# Altium schematic symbol library 调理电路板.SCHLIB: 432 symbols (part 7 of 8)
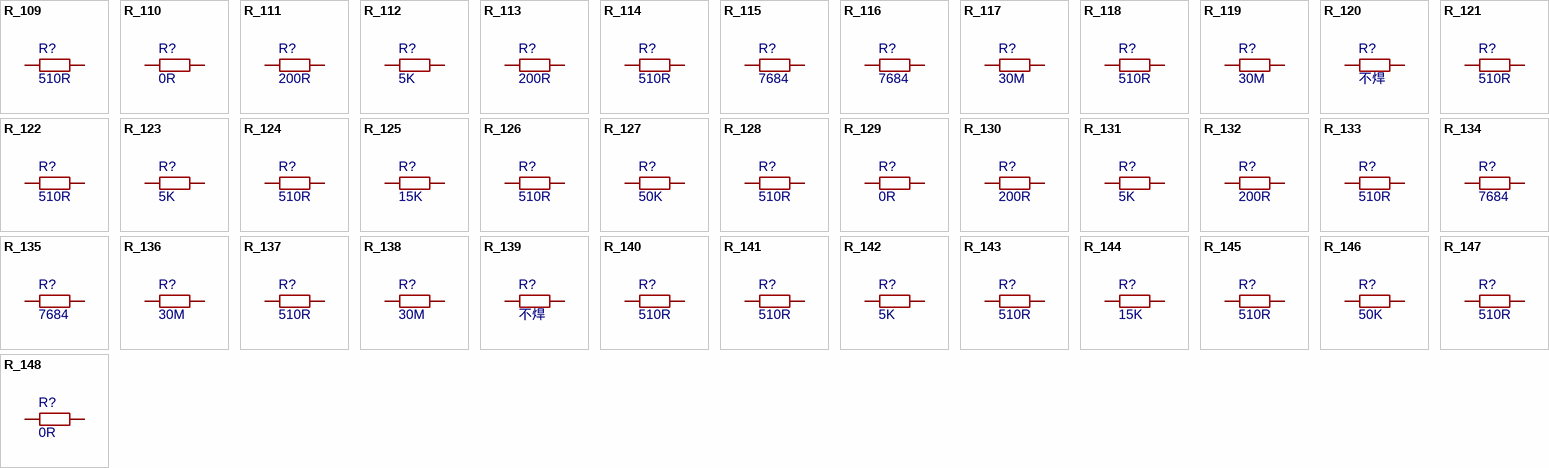
[diagram p16: symbols R_109 to R_148]

## R_144
designator R?, comment 15K
贴片电阻; Device: R; 版权归属: 来自淘宝 ID：黄晶宝石; 封装库来自淘宝卖家 ID：黄晶宝石: 其他店铺购入均为盗版，不享受售后技术支持服务，请立即申请退款; Origin Footprint: R 0201_L; OriginFootprint 2: R 0402_L; OriginFootprint 3: R 0805_L; OriginFootprint 4: R 1206_L; OriginFootprint 5: R 1210_L; OriginFootprint 6: R 1812_L; OriginFootprint 7: R 2010_L; OriginFootprint 8: R 2512_L; OriginFootprint 9: R 0201_M; OriginFootprint 10: R 0402_M; OriginFootprint 11: R 0603_M; OriginFootprint 12: R 0805_M; OriginFootprint 13: R 1206_M; OriginFootprint 14: R 1210_M; OriginFootprint 15: R 1812_M; OriginFootprint 16: R 2010_M; OriginFootprint 17: R 2512_M; UniqueId: c8e7fea75ae2c195; AddInBom: yes; OriginModelName: R 0603; BOM名称: 贴片电阻; 联系售后: https://shop463601444.taobao.com; DesignItemID: R; LibraryName: 0.1 - 电阻-电容-电感; SymbolName: R; FootprintName: R 0603_L
footprint R 0603_L
pins: 1, 2

## R_145
designator R?, comment 510R
贴片电阻; Device: R; 版权归属: 来自淘宝 ID：黄晶宝石; 封装库来自淘宝卖家 ID：黄晶宝石: 其他店铺购入均为盗版，不享受售后技术支持服务，请立即申请退款; Origin Footprint: R 0201_L; OriginFootprint 2: R 0402_L; OriginFootprint 3: R 0805_L; OriginFootprint 4: R 1206_L; OriginFootprint 5: R 1210_L; OriginFootprint 6: R 1812_L; OriginFootprint 7: R 2010_L; OriginFootprint 8: R 2512_L; OriginFootprint 9: R 0201_M; OriginFootprint 10: R 0402_M; OriginFootprint 11: R 0603_M; OriginFootprint 12: R 0805_M; OriginFootprint 13: R 1206_M; OriginFootprint 14: R 1210_M; OriginFootprint 15: R 1812_M; OriginFootprint 16: R 2010_M; OriginFootprint 17: R 2512_M; UniqueId: 0a743140f9ea7b14; AddInBom: yes; OriginModelName: R 0603; BOM名称: 贴片电阻; 联系售后: https://shop463601444.taobao.com; DesignItemID: R; LibraryName: 0.1 - 电阻-电容-电感; SymbolName: R; FootprintName: R 0603_L
footprint R 0603_L
pins: 1, 2

## R_146
designator R?, comment 50K
贴片电阻; Device: R; 版权归属: 来自淘宝 ID：黄晶宝石; 封装库来自淘宝卖家 ID：黄晶宝石: 其他店铺购入均为盗版，不享受售后技术支持服务，请立即申请退款; Origin Footprint: R 0201_L; OriginFootprint 2: R 0402_L; OriginFootprint 3: R 0805_L; OriginFootprint 4: R 1206_L; OriginFootprint 5: R 1210_L; OriginFootprint 6: R 1812_L; OriginFootprint 7: R 2010_L; OriginFootprint 8: R 2512_L; OriginFootprint 9: R 0201_M; OriginFootprint 10: R 0402_M; OriginFootprint 11: R 0603_M; OriginFootprint 12: R 0805_M; OriginFootprint 13: R 1206_M; OriginFootprint 14: R 1210_M; OriginFootprint 15: R 1812_M; OriginFootprint 16: R 2010_M; OriginFootprint 17: R 2512_M; UniqueId: 214b1954295082c1; AddInBom: yes; OriginModelName: R 0603; BOM名称: 贴片电阻; 联系售后: https://shop463601444.taobao.com; DesignItemID: R; LibraryName: 0.1 - 电阻-电容-电感; SymbolName: R; FootprintName: R 0603_L
footprint R 0603_L
pins: 1, 2

## R_147
designator R?, comment 510R
贴片电阻; Device: R; 版权归属: 来自淘宝 ID：黄晶宝石; 封装库来自淘宝卖家 ID：黄晶宝石: 其他店铺购入均为盗版，不享受售后技术支持服务，请立即申请退款; Origin Footprint: R 0201_L; OriginFootprint 2: R 0402_L; OriginFootprint 3: R 0805_L; OriginFootprint 4: R 1206_L; OriginFootprint 5: R 1210_L; OriginFootprint 6: R 1812_L; OriginFootprint 7: R 2010_L; OriginFootprint 8: R 2512_L; OriginFootprint 9: R 0201_M; OriginFootprint 10: R 0402_M; OriginFootprint 11: R 0603_M; OriginFootprint 12: R 0805_M; OriginFootprint 13: R 1206_M; OriginFootprint 14: R 1210_M; OriginFootprint 15: R 1812_M; OriginFootprint 16: R 2010_M; OriginFootprint 17: R 2512_M; UniqueId: 21524ddd3d38a4e3; AddInBom: yes; OriginModelName: R 0603; BOM名称: 贴片电阻; 联系售后: https://shop463601444.taobao.com; DesignItemID: R; LibraryName: 0.1 - 电阻-电容-电感; SymbolName: R; FootprintName: R 0603_L
footprint R 0603_L
pins: 1, 2

## R_148
designator R?, comment 0R
贴片电阻; Device: R; 版权归属: 来自淘宝 ID：黄晶宝石; 封装库来自淘宝卖家 ID：黄晶宝石: 其他店铺购入均为盗版，不享受售后技术支持服务，请立即申请退款; Origin Footprint: R 0201_L; OriginFootprint 2: R 0402_L; OriginFootprint 3: R 0805_L; OriginFootprint 4: R 1206_L; OriginFootprint 5: R 1210_L; OriginFootprint 6: R 1812_L; OriginFootprint 7: R 2010_L; OriginFootprint 8: R 2512_L; OriginFootprint 9: R 0201_M; OriginFootprint 10: R 0402_M; OriginFootprint 11: R 0603_M; OriginFootprint 12: R 0805_M; OriginFootprint 13: R 1206_M; OriginFootprint 14: R 1210_M; OriginFootprint 15: R 1812_M; OriginFootprint 16: R 2010_M; OriginFootprint 17: R 2512_M; UniqueId: 58812c969b98ff54; AddInBom: yes; OriginModelName: R 0603; BOM名称: 贴片电阻; 联系售后: https://shop463601444.taobao.com; DesignItemID: R; LibraryName: 0.1 - 电阻-电容-电感; SymbolName: R; FootprintName: R 0603_L
footprint R 0603_L
pins: 1, 2

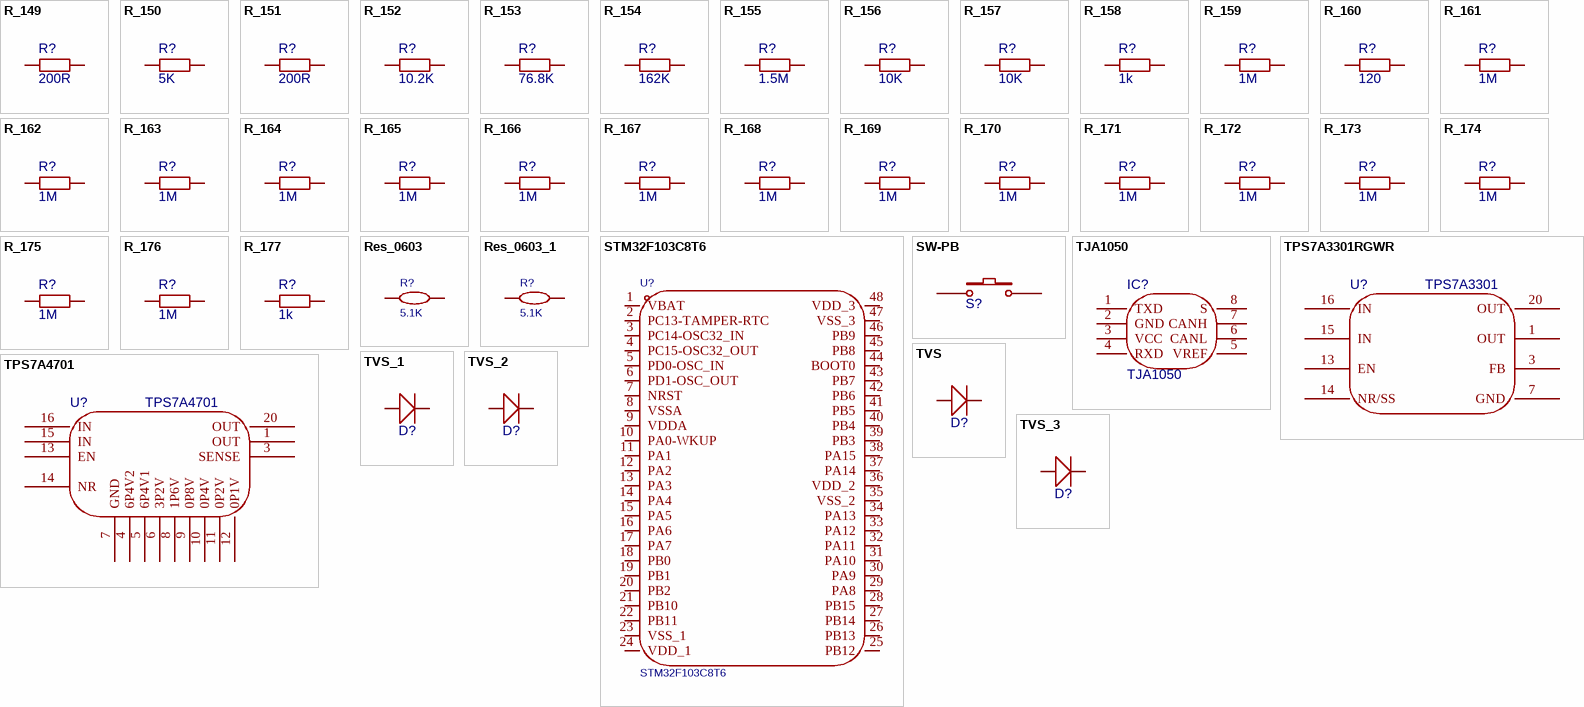
[diagram p9: symbols R_149 to TVS_3]

## R_149
designator R?, comment 200R
贴片电阻; Device: R; 版权归属: 来自淘宝 ID：黄晶宝石; 封装库来自淘宝卖家 ID：黄晶宝石: 其他店铺购入均为盗版，不享受售后技术支持服务，请立即申请退款; Origin Footprint: R 0201_L; OriginFootprint 2: R 0402_L; OriginFootprint 3: R 0805_L; OriginFootprint 4: R 1206_L; OriginFootprint 5: R 1210_L; OriginFootprint 6: R 1812_L; OriginFootprint 7: R 2010_L; OriginFootprint 8: R 2512_L; OriginFootprint 9: R 0201_M; OriginFootprint 10: R 0402_M; OriginFootprint 11: R 0603_M; OriginFootprint 12: R 0805_M; OriginFootprint 13: R 1206_M; OriginFootprint 14: R 1210_M; OriginFootprint 15: R 1812_M; OriginFootprint 16: R 2010_M; OriginFootprint 17: R 2512_M; UniqueId: f788f9d74fd2ea8c; AddInBom: yes; OriginModelName: R 0603; BOM名称: 贴片电阻; 联系售后: https://shop463601444.taobao.com; DesignItemID: R; LibraryName: 0.1 - 电阻-电容-电感; SymbolName: R; FootprintName: R 0603_L
footprint R 0603_L
pins: 1, 2

## R_150
designator R?, comment 5K
贴片电阻; Device: R; 版权归属: 来自淘宝 ID：黄晶宝石; 封装库来自淘宝卖家 ID：黄晶宝石: 其他店铺购入均为盗版，不享受售后技术支持服务，请立即申请退款; Origin Footprint: R 0201_L; OriginFootprint 2: R 0402_L; OriginFootprint 3: R 0805_L; OriginFootprint 4: R 1206_L; OriginFootprint 5: R 1210_L; OriginFootprint 6: R 1812_L; OriginFootprint 7: R 2010_L; OriginFootprint 8: R 2512_L; OriginFootprint 9: R 0201_M; OriginFootprint 10: R 0402_M; OriginFootprint 11: R 0603_M; OriginFootprint 12: R 0805_M; OriginFootprint 13: R 1206_M; OriginFootprint 14: R 1210_M; OriginFootprint 15: R 1812_M; OriginFootprint 16: R 2010_M; OriginFootprint 17: R 2512_M; UniqueId: 5e1d1d1645697b34; AddInBom: yes; OriginModelName: R 0603; BOM名称: 贴片电阻; 联系售后: https://shop463601444.taobao.com; DesignItemID: R; LibraryName: 0.1 - 电阻-电容-电感; SymbolName: R; FootprintName: R 0603_L
footprint R 0603_L
pins: 1, 2

## R_151
designator R?, comment 200R
贴片电阻; Device: R; 版权归属: 来自淘宝 ID：黄晶宝石; 封装库来自淘宝卖家 ID：黄晶宝石: 其他店铺购入均为盗版，不享受售后技术支持服务，请立即申请退款; Origin Footprint: R 0201_L; OriginFootprint 2: R 0402_L; OriginFootprint 3: R 0805_L; OriginFootprint 4: R 1206_L; OriginFootprint 5: R 1210_L; OriginFootprint 6: R 1812_L; OriginFootprint 7: R 2010_L; OriginFootprint 8: R 2512_L; OriginFootprint 9: R 0201_M; OriginFootprint 10: R 0402_M; OriginFootprint 11: R 0603_M; OriginFootprint 12: R 0805_M; OriginFootprint 13: R 1206_M; OriginFootprint 14: R 1210_M; OriginFootprint 15: R 1812_M; OriginFootprint 16: R 2010_M; OriginFootprint 17: R 2512_M; UniqueId: e95d98ae4f6ade20; AddInBom: yes; OriginModelName: R 0603; BOM名称: 贴片电阻; 联系售后: https://shop463601444.taobao.com; DesignItemID: R; LibraryName: 0.1 - 电阻-电容-电感; SymbolName: R; FootprintName: R 0603_L
footprint R 0603_L
pins: 1, 2

## R_152
designator R?, comment 10.2K
贴片电阻; Device: R; 版权归属: 来自淘宝 ID：黄晶宝石; 封装库来自淘宝卖家 ID：黄晶宝石: 其他店铺购入均为盗版，不享受售后技术支持服务，请立即申请退款; Origin Footprint: R 0201_L; OriginFootprint 2: R 0402_L; OriginFootprint 3: R 0805_L; OriginFootprint 4: R 1206_L; OriginFootprint 5: R 1210_L; OriginFootprint 6: R 1812_L; OriginFootprint 7: R 2010_L; OriginFootprint 8: R 2512_L; OriginFootprint 9: R 0201_M; OriginFootprint 10: R 0402_M; OriginFootprint 11: R 0603_M; OriginFootprint 12: R 0805_M; OriginFootprint 13: R 1206_M; OriginFootprint 14: R 1210_M; OriginFootprint 15: R 1812_M; OriginFootprint 16: R 2010_M; OriginFootprint 17: R 2512_M; UniqueId: a4530fd3332868cb; AddInBom: yes; OriginModelName: R 0603; BOM名称: 贴片电阻; 联系售后: https://shop463601444.taobao.com; DesignItemID: R; LibraryName: 0.1 - 电阻-电容-电感; SymbolName: R; FootprintName: R 0603_L
footprint R 0603_L
pins: 1, 2

## R_153
designator R?, comment 76.8K
贴片电阻; Device: R; 版权归属: 来自淘宝 ID：黄晶宝石; 封装库来自淘宝卖家 ID：黄晶宝石: 其他店铺购入均为盗版，不享受售后技术支持服务，请立即申请退款; Origin Footprint: R 0201_L; OriginFootprint 2: R 0402_L; OriginFootprint 3: R 0805_L; OriginFootprint 4: R 1206_L; OriginFootprint 5: R 1210_L; OriginFootprint 6: R 1812_L; OriginFootprint 7: R 2010_L; OriginFootprint 8: R 2512_L; OriginFootprint 9: R 0201_M; OriginFootprint 10: R 0402_M; OriginFootprint 11: R 0603_M; OriginFootprint 12: R 0805_M; OriginFootprint 13: R 1206_M; OriginFootprint 14: R 1210_M; OriginFootprint 15: R 1812_M; OriginFootprint 16: R 2010_M; OriginFootprint 17: R 2512_M; UniqueId: b63c70a29a00d898; AddInBom: yes; OriginModelName: R 0603; BOM名称: 贴片电阻; 联系售后: https://shop463601444.taobao.com; DesignItemID: R; LibraryName: 0.1 - 电阻-电容-电感; SymbolName: R; FootprintName: R 0603_L
footprint R 0603_L
pins: 1, 2

## R_154
designator R?, comment 162K
贴片电阻; Device: R; 版权归属: 来自淘宝 ID：黄晶宝石; 封装库来自淘宝卖家 ID：黄晶宝石: 其他店铺购入均为盗版，不享受售后技术支持服务，请立即申请退款; Origin Footprint: R 0201_L; OriginFootprint 2: R 0402_L; OriginFootprint 3: R 0805_L; OriginFootprint 4: R 1206_L; OriginFootprint 5: R 1210_L; OriginFootprint 6: R 1812_L; OriginFootprint 7: R 2010_L; OriginFootprint 8: R 2512_L; OriginFootprint 9: R 0201_M; OriginFootprint 10: R 0402_M; OriginFootprint 11: R 0603_M; OriginFootprint 12: R 0805_M; OriginFootprint 13: R 1206_M; OriginFootprint 14: R 1210_M; OriginFootprint 15: R 1812_M; OriginFootprint 16: R 2010_M; OriginFootprint 17: R 2512_M; UniqueId: 244f6e1f247c71b7; AddInBom: yes; OriginModelName: R 0603; BOM名称: 贴片电阻; 联系售后: https://shop463601444.taobao.com; DesignItemID: R; LibraryName: 0.1 - 电阻-电容-电感; SymbolName: R; FootprintName: R 0603_L
footprint R 0603_L
pins: 1, 2

## R_155
designator R?, comment 1.5M
贴片电阻; Device: R; 版权归属: 来自淘宝 ID：黄晶宝石; 封装库来自淘宝卖家 ID：黄晶宝石: 其他店铺购入均为盗版，不享受售后技术支持服务，请立即申请退款; Origin Footprint: R 0201_L; OriginFootprint 2: R 0402_L; OriginFootprint 3: R 0805_L; OriginFootprint 4: R 1206_L; OriginFootprint 5: R 1210_L; OriginFootprint 6: R 1812_L; OriginFootprint 7: R 2010_L; OriginFootprint 8: R 2512_L; OriginFootprint 9: R 0201_M; OriginFootprint 10: R 0402_M; OriginFootprint 11: R 0603_M; OriginFootprint 12: R 0805_M; OriginFootprint 13: R 1206_M; OriginFootprint 14: R 1210_M; OriginFootprint 15: R 1812_M; OriginFootprint 16: R 2010_M; OriginFootprint 17: R 2512_M; UniqueId: 361000c835d78b62; AddInBom: yes; OriginModelName: R 0603; BOM名称: 贴片电阻; 联系售后: https://shop463601444.taobao.com; DesignItemID: R; LibraryName: 0.1 - 电阻-电容-电感; SymbolName: R; FootprintName: R 0603_L
footprint R 0603_L
pins: 1, 2

## R_156
designator R?, comment 10K
贴片电阻; Device: R; 版权归属: 来自淘宝 ID：黄晶宝石; 封装库来自淘宝卖家 ID：黄晶宝石: 其他店铺购入均为盗版，不享受售后技术支持服务，请立即申请退款; Origin Footprint: R 0201_L; OriginFootprint 2: R 0402_L; OriginFootprint 3: R 0805_L; OriginFootprint 4: R 1206_L; OriginFootprint 5: R 1210_L; OriginFootprint 6: R 1812_L; OriginFootprint 7: R 2010_L; OriginFootprint 8: R 2512_L; OriginFootprint 9: R 0201_M; OriginFootprint 10: R 0402_M; OriginFootprint 11: R 0603_M; OriginFootprint 12: R 0805_M; OriginFootprint 13: R 1206_M; OriginFootprint 14: R 1210_M; OriginFootprint 15: R 1812_M; OriginFootprint 16: R 2010_M; OriginFootprint 17: R 2512_M; UniqueId: 220907c6c27367a9; AddInBom: yes; OriginModelName: R 0603; BOM名称: 贴片电阻; 联系售后: https://shop463601444.taobao.com; DesignItemID: R; LibraryName: 0.1 - 电阻-电容-电感; SymbolName: R; FootprintName: R 0603_L
footprint R 0603_L
pins: 1, 2

## R_157
designator R?, comment 10K
贴片电阻; Device: R; 版权归属: 来自淘宝 ID：黄晶宝石; 封装库来自淘宝卖家 ID：黄晶宝石: 其他店铺购入均为盗版，不享受售后技术支持服务，请立即申请退款; Origin Footprint: R 0201_L; OriginFootprint 2: R 0402_L; OriginFootprint 3: R 0805_L; OriginFootprint 4: R 1206_L; OriginFootprint 5: R 1210_L; OriginFootprint 6: R 1812_L; OriginFootprint 7: R 2010_L; OriginFootprint 8: R 2512_L; OriginFootprint 9: R 0201_M; OriginFootprint 10: R 0402_M; OriginFootprint 11: R 0603_M; OriginFootprint 12: R 0805_M; OriginFootprint 13: R 1206_M; OriginFootprint 14: R 1210_M; OriginFootprint 15: R 1812_M; OriginFootprint 16: R 2010_M; OriginFootprint 17: R 2512_M; AddInBom: yes; OriginModelName: R 0603; BOM名称: 贴片电阻; 联系售后: https://shop463601444.taobao.com; DesignItemID: R; LibraryName: 0.1 - 电阻-电容-电感; Symbol: R; FootprintName: R 0603_L
footprint R 0603_L
pins: 1, 2

## R_158
designator R?, comment 1k
贴片电阻; Device: R; 版权归属: 来自淘宝 ID：黄晶宝石; 封装库来自淘宝卖家 ID：黄晶宝石: 其他店铺购入均为盗版，不享受售后技术支持服务，请立即申请退款; Origin Footprint: R 0201_L; OriginFootprint 2: R 0402_L; OriginFootprint 3: R 0805_L; OriginFootprint 4: R 1206_L; OriginFootprint 5: R 1210_L; OriginFootprint 6: R 1812_L; OriginFootprint 7: R 2010_L; OriginFootprint 8: R 2512_L; OriginFootprint 9: R 0201_M; OriginFootprint 10: R 0402_M; OriginFootprint 11: R 0603_M; OriginFootprint 12: R 0805_M; OriginFootprint 13: R 1206_M; OriginFootprint 14: R 1210_M; OriginFootprint 15: R 1812_M; OriginFootprint 16: R 2010_M; OriginFootprint 17: R 2512_M; AddInBom: yes; OriginModelName: R 0603; BOM名称: 贴片电阻; 联系售后: https://shop463601444.taobao.com; DesignItemID: R; LibraryName: 0.1 - 电阻-电容-电感; Symbol: R; FootprintName: R 0603_L
footprint R 0603_L
pins: 1, 2

## R_159
designator R?, comment 1M
贴片电阻; Device: R; 版权归属: 来自淘宝 ID：黄晶宝石; 封装库来自淘宝卖家 ID：黄晶宝石: 其他店铺购入均为盗版，不享受售后技术支持服务，请立即申请退款; Origin Footprint: R 0201_L; OriginFootprint 2: R 0402_L; OriginFootprint 3: R 0805_L; OriginFootprint 4: R 1206_L; OriginFootprint 5: R 1210_L; OriginFootprint 6: R 1812_L; OriginFootprint 7: R 2010_L; OriginFootprint 8: R 2512_L; OriginFootprint 9: R 0201_M; OriginFootprint 10: R 0402_M; OriginFootprint 11: R 0603_M; OriginFootprint 12: R 0805_M; OriginFootprint 13: R 1206_M; OriginFootprint 14: R 1210_M; OriginFootprint 15: R 1812_M; OriginFootprint 16: R 2010_M; OriginFootprint 17: R 2512_M; UniqueId: 7eccde09fa314729; AddInBom: yes; OriginModelName: R 0603; BOM名称: 贴片电阻; 联系售后: https://shop463601444.taobao.com; DesignItemID: R; LibraryName: 0.1 - 电阻-电容-电感; SymbolName: R; FootprintName: R 0603_L
footprint R 0603_L
pins: 1, 2

## R_160
designator R?, comment 120
贴片电阻; Device: R; 版权归属: 来自淘宝 ID：黄晶宝石; 封装库来自淘宝卖家 ID：黄晶宝石: 其他店铺购入均为盗版，不享受售后技术支持服务，请立即申请退款; Origin Footprint: R 0201_L; OriginFootprint 2: R 0402_L; OriginFootprint 3: R 0805_L; OriginFootprint 4: R 1206_L; OriginFootprint 5: R 1210_L; OriginFootprint 6: R 1812_L; OriginFootprint 7: R 2010_L; OriginFootprint 8: R 2512_L; OriginFootprint 9: R 0201_M; OriginFootprint 10: R 0402_M; OriginFootprint 11: R 0603_M; OriginFootprint 12: R 0805_M; OriginFootprint 13: R 1206_M; OriginFootprint 14: R 1210_M; OriginFootprint 15: R 1812_M; OriginFootprint 16: R 2010_M; OriginFootprint 17: R 2512_M; UniqueId: 806050350f822c5c; AddInBom: yes; OriginModelName: R 0603; BOM名称: 贴片电阻; 联系售后: https://shop463601444.taobao.com; DesignItemID: R; LibraryName: 0.1 - 电阻-电容-电感; SymbolName: R; FootprintName: R 0603_L
footprint R 0603_L
pins: 1, 2

## R_161
designator R?, comment 1M
贴片电阻; Device: R; 版权归属: 来自淘宝 ID：黄晶宝石; 封装库来自淘宝卖家 ID：黄晶宝石: 其他店铺购入均为盗版，不享受售后技术支持服务，请立即申请退款; Origin Footprint: R 0201_L; OriginFootprint 2: R 0402_L; OriginFootprint 3: R 0805_L; OriginFootprint 4: R 1206_L; OriginFootprint 5: R 1210_L; OriginFootprint 6: R 1812_L; OriginFootprint 7: R 2010_L; OriginFootprint 8: R 2512_L; OriginFootprint 9: R 0201_M; OriginFootprint 10: R 0402_M; OriginFootprint 11: R 0603_M; OriginFootprint 12: R 0805_M; OriginFootprint 13: R 1206_M; OriginFootprint 14: R 1210_M; OriginFootprint 15: R 1812_M; OriginFootprint 16: R 2010_M; OriginFootprint 17: R 2512_M; UniqueId: c77b08197b178948; AddInBom: yes; OriginModelName: R 0603; BOM名称: 贴片电阻; 联系售后: https://shop463601444.taobao.com; DesignItemID: R; LibraryName: 0.1 - 电阻-电容-电感; SymbolName: R; FootprintName: R 0603_L
footprint R 0603_L
pins: 1, 2

## R_162
designator R?, comment 1M
贴片电阻; Device: R; 版权归属: 来自淘宝 ID：黄晶宝石; 封装库来自淘宝卖家 ID：黄晶宝石: 其他店铺购入均为盗版，不享受售后技术支持服务，请立即申请退款; Origin Footprint: R 0201_L; OriginFootprint 2: R 0402_L; OriginFootprint 3: R 0805_L; OriginFootprint 4: R 1206_L; OriginFootprint 5: R 1210_L; OriginFootprint 6: R 1812_L; OriginFootprint 7: R 2010_L; OriginFootprint 8: R 2512_L; OriginFootprint 9: R 0201_M; OriginFootprint 10: R 0402_M; OriginFootprint 11: R 0603_M; OriginFootprint 12: R 0805_M; OriginFootprint 13: R 1206_M; OriginFootprint 14: R 1210_M; OriginFootprint 15: R 1812_M; OriginFootprint 16: R 2010_M; OriginFootprint 17: R 2512_M; UniqueId: 6346d187b4e0bc9c; AddInBom: yes; OriginModelName: R 0603; BOM名称: 贴片电阻; 联系售后: https://shop463601444.taobao.com; DesignItemID: R; LibraryName: 0.1 - 电阻-电容-电感; SymbolName: R; FootprintName: R 0603_L
footprint R 0603_L
pins: 1, 2

## R_163
designator R?, comment 1M
贴片电阻; Device: R; 版权归属: 来自淘宝 ID：黄晶宝石; 封装库来自淘宝卖家 ID：黄晶宝石: 其他店铺购入均为盗版，不享受售后技术支持服务，请立即申请退款; Origin Footprint: R 0201_L; OriginFootprint 2: R 0402_L; OriginFootprint 3: R 0805_L; OriginFootprint 4: R 1206_L; OriginFootprint 5: R 1210_L; OriginFootprint 6: R 1812_L; OriginFootprint 7: R 2010_L; OriginFootprint 8: R 2512_L; OriginFootprint 9: R 0201_M; OriginFootprint 10: R 0402_M; OriginFootprint 11: R 0603_M; OriginFootprint 12: R 0805_M; OriginFootprint 13: R 1206_M; OriginFootprint 14: R 1210_M; OriginFootprint 15: R 1812_M; OriginFootprint 16: R 2010_M; OriginFootprint 17: R 2512_M; UniqueId: bff15d8574907f05; AddInBom: yes; OriginModelName: R 0603; BOM名称: 贴片电阻; 联系售后: https://shop463601444.taobao.com; DesignItemID: R; LibraryName: 0.1 - 电阻-电容-电感; SymbolName: R; FootprintName: R 0603_L
footprint R 0603_L
pins: 1, 2

## R_164
designator R?, comment 1M
贴片电阻; Device: R; 版权归属: 来自淘宝 ID：黄晶宝石; 封装库来自淘宝卖家 ID：黄晶宝石: 其他店铺购入均为盗版，不享受售后技术支持服务，请立即申请退款; Origin Footprint: R 0201_L; OriginFootprint 2: R 0402_L; OriginFootprint 3: R 0805_L; OriginFootprint 4: R 1206_L; OriginFootprint 5: R 1210_L; OriginFootprint 6: R 1812_L; OriginFootprint 7: R 2010_L; OriginFootprint 8: R 2512_L; OriginFootprint 9: R 0201_M; OriginFootprint 10: R 0402_M; OriginFootprint 11: R 0603_M; OriginFootprint 12: R 0805_M; OriginFootprint 13: R 1206_M; OriginFootprint 14: R 1210_M; OriginFootprint 15: R 1812_M; OriginFootprint 16: R 2010_M; OriginFootprint 17: R 2512_M; UniqueId: c01349837f54e403; AddInBom: yes; OriginModelName: R 0603; BOM名称: 贴片电阻; 联系售后: https://shop463601444.taobao.com; DesignItemID: R; LibraryName: 0.1 - 电阻-电容-电感; SymbolName: R; FootprintName: R 0603_L
footprint R 0603_L
pins: 1, 2

## R_165
designator R?, comment 1M
贴片电阻; Device: R; 版权归属: 来自淘宝 ID：黄晶宝石; 封装库来自淘宝卖家 ID：黄晶宝石: 其他店铺购入均为盗版，不享受售后技术支持服务，请立即申请退款; Origin Footprint: R 0201_L; OriginFootprint 2: R 0402_L; OriginFootprint 3: R 0805_L; OriginFootprint 4: R 1206_L; OriginFootprint 5: R 1210_L; OriginFootprint 6: R 1812_L; OriginFootprint 7: R 2010_L; OriginFootprint 8: R 2512_L; OriginFootprint 9: R 0201_M; OriginFootprint 10: R 0402_M; OriginFootprint 11: R 0603_M; OriginFootprint 12: R 0805_M; OriginFootprint 13: R 1206_M; OriginFootprint 14: R 1210_M; OriginFootprint 15: R 1812_M; OriginFootprint 16: R 2010_M; OriginFootprint 17: R 2512_M; UniqueId: 0c6e0d191081ab64; AddInBom: yes; OriginModelName: R 0603; BOM名称: 贴片电阻; 联系售后: https://shop463601444.taobao.com; DesignItemID: R; LibraryName: 0.1 - 电阻-电容-电感; SymbolName: R; FootprintName: R 0603_L
footprint R 0603_L
pins: 1, 2

## R_166
designator R?, comment 1M
贴片电阻; Device: R; 版权归属: 来自淘宝 ID：黄晶宝石; 封装库来自淘宝卖家 ID：黄晶宝石: 其他店铺购入均为盗版，不享受售后技术支持服务，请立即申请退款; Origin Footprint: R 0201_L; OriginFootprint 2: R 0402_L; OriginFootprint 3: R 0805_L; OriginFootprint 4: R 1206_L; OriginFootprint 5: R 1210_L; OriginFootprint 6: R 1812_L; OriginFootprint 7: R 2010_L; OriginFootprint 8: R 2512_L; OriginFootprint 9: R 0201_M; OriginFootprint 10: R 0402_M; OriginFootprint 11: R 0603_M; OriginFootprint 12: R 0805_M; OriginFootprint 13: R 1206_M; OriginFootprint 14: R 1210_M; OriginFootprint 15: R 1812_M; OriginFootprint 16: R 2010_M; OriginFootprint 17: R 2512_M; UniqueId: 889d12715e24a8d6; AddInBom: yes; OriginModelName: R 0603; BOM名称: 贴片电阻; 联系售后: https://shop463601444.taobao.com; DesignItemID: R; LibraryName: 0.1 - 电阻-电容-电感; SymbolName: R; FootprintName: R 0603_L
footprint R 0603_L
pins: 1, 2

## R_167
designator R?, comment 1M
贴片电阻; Device: R; 版权归属: 来自淘宝 ID：黄晶宝石; 封装库来自淘宝卖家 ID：黄晶宝石: 其他店铺购入均为盗版，不享受售后技术支持服务，请立即申请退款; Origin Footprint: R 0201_L; OriginFootprint 2: R 0402_L; OriginFootprint 3: R 0805_L; OriginFootprint 4: R 1206_L; OriginFootprint 5: R 1210_L; OriginFootprint 6: R 1812_L; OriginFootprint 7: R 2010_L; OriginFootprint 8: R 2512_L; OriginFootprint 9: R 0201_M; OriginFootprint 10: R 0402_M; OriginFootprint 11: R 0603_M; OriginFootprint 12: R 0805_M; OriginFootprint 13: R 1206_M; OriginFootprint 14: R 1210_M; OriginFootprint 15: R 1812_M; OriginFootprint 16: R 2010_M; OriginFootprint 17: R 2512_M; UniqueId: c493e37185c9a37a; AddInBom: yes; OriginModelName: R 0603; BOM名称: 贴片电阻; 联系售后: https://shop463601444.taobao.com; DesignItemID: R; LibraryName: 0.1 - 电阻-电容-电感; SymbolName: R; FootprintName: R 0603_L
footprint R 0603_L
pins: 1, 2

## R_168
designator R?, comment 1M
贴片电阻; Device: R; 版权归属: 来自淘宝 ID：黄晶宝石; 封装库来自淘宝卖家 ID：黄晶宝石: 其他店铺购入均为盗版，不享受售后技术支持服务，请立即申请退款; Origin Footprint: R 0201_L; OriginFootprint 2: R 0402_L; OriginFootprint 3: R 0805_L; OriginFootprint 4: R 1206_L; OriginFootprint 5: R 1210_L; OriginFootprint 6: R 1812_L; OriginFootprint 7: R 2010_L; OriginFootprint 8: R 2512_L; OriginFootprint 9: R 0201_M; OriginFootprint 10: R 0402_M; OriginFootprint 11: R 0603_M; OriginFootprint 12: R 0805_M; OriginFootprint 13: R 1206_M; OriginFootprint 14: R 1210_M; OriginFootprint 15: R 1812_M; OriginFootprint 16: R 2010_M; OriginFootprint 17: R 2512_M; UniqueId: 218941dfd0f8db56; AddInBom: yes; OriginModelName: R 0603; BOM名称: 贴片电阻; 联系售后: https://shop463601444.taobao.com; DesignItemID: R; LibraryName: 0.1 - 电阻-电容-电感; SymbolName: R; FootprintName: R 0603_L
footprint R 0603_L
pins: 1, 2

## R_169
designator R?, comment 1M
贴片电阻; Device: R; 版权归属: 来自淘宝 ID：黄晶宝石; 封装库来自淘宝卖家 ID：黄晶宝石: 其他店铺购入均为盗版，不享受售后技术支持服务，请立即申请退款; Origin Footprint: R 0201_L; OriginFootprint 2: R 0402_L; OriginFootprint 3: R 0805_L; OriginFootprint 4: R 1206_L; OriginFootprint 5: R 1210_L; OriginFootprint 6: R 1812_L; OriginFootprint 7: R 2010_L; OriginFootprint 8: R 2512_L; OriginFootprint 9: R 0201_M; OriginFootprint 10: R 0402_M; OriginFootprint 11: R 0603_M; OriginFootprint 12: R 0805_M; OriginFootprint 13: R 1206_M; OriginFootprint 14: R 1210_M; OriginFootprint 15: R 1812_M; OriginFootprint 16: R 2010_M; OriginFootprint 17: R 2512_M; UniqueId: 99e92980a63df761; AddInBom: yes; OriginModelName: R 0603; BOM名称: 贴片电阻; 联系售后: https://shop463601444.taobao.com; DesignItemID: R; LibraryName: 0.1 - 电阻-电容-电感; SymbolName: R; FootprintName: R 0603_L
footprint R 0603_L
pins: 1, 2

## R_170
designator R?, comment 1M
贴片电阻; Device: R; 版权归属: 来自淘宝 ID：黄晶宝石; 封装库来自淘宝卖家 ID：黄晶宝石: 其他店铺购入均为盗版，不享受售后技术支持服务，请立即申请退款; Origin Footprint: R 0201_L; OriginFootprint 2: R 0402_L; OriginFootprint 3: R 0805_L; OriginFootprint 4: R 1206_L; OriginFootprint 5: R 1210_L; OriginFootprint 6: R 1812_L; OriginFootprint 7: R 2010_L; OriginFootprint 8: R 2512_L; OriginFootprint 9: R 0201_M; OriginFootprint 10: R 0402_M; OriginFootprint 11: R 0603_M; OriginFootprint 12: R 0805_M; OriginFootprint 13: R 1206_M; OriginFootprint 14: R 1210_M; OriginFootprint 15: R 1812_M; OriginFootprint 16: R 2010_M; OriginFootprint 17: R 2512_M; UniqueId: e02581fd9dd83676; AddInBom: yes; OriginModelName: R 0603; BOM名称: 贴片电阻; 联系售后: https://shop463601444.taobao.com; DesignItemID: R; LibraryName: 0.1 - 电阻-电容-电感; SymbolName: R; FootprintName: R 0603_L
footprint R 0603_L
pins: 1, 2

## R_171
designator R?, comment 1M
贴片电阻; Device: R; 版权归属: 来自淘宝 ID：黄晶宝石; 封装库来自淘宝卖家 ID：黄晶宝石: 其他店铺购入均为盗版，不享受售后技术支持服务，请立即申请退款; Origin Footprint: R 0201_L; OriginFootprint 2: R 0402_L; OriginFootprint 3: R 0805_L; OriginFootprint 4: R 1206_L; OriginFootprint 5: R 1210_L; OriginFootprint 6: R 1812_L; OriginFootprint 7: R 2010_L; OriginFootprint 8: R 2512_L; OriginFootprint 9: R 0201_M; OriginFootprint 10: R 0402_M; OriginFootprint 11: R 0603_M; OriginFootprint 12: R 0805_M; OriginFootprint 13: R 1206_M; OriginFootprint 14: R 1210_M; OriginFootprint 15: R 1812_M; OriginFootprint 16: R 2010_M; OriginFootprint 17: R 2512_M; UniqueId: 0e69257913149112; AddInBom: yes; OriginModelName: R 0603; BOM名称: 贴片电阻; 联系售后: https://shop463601444.taobao.com; DesignItemID: R; LibraryName: 0.1 - 电阻-电容-电感; SymbolName: R; FootprintName: R 0603_L
footprint R 0603_L
pins: 1, 2

## R_172
designator R?, comment 1M
贴片电阻; Device: R; 版权归属: 来自淘宝 ID：黄晶宝石; 封装库来自淘宝卖家 ID：黄晶宝石: 其他店铺购入均为盗版，不享受售后技术支持服务，请立即申请退款; Origin Footprint: R 0201_L; OriginFootprint 2: R 0402_L; OriginFootprint 3: R 0805_L; OriginFootprint 4: R 1206_L; OriginFootprint 5: R 1210_L; OriginFootprint 6: R 1812_L; OriginFootprint 7: R 2010_L; OriginFootprint 8: R 2512_L; OriginFootprint 9: R 0201_M; OriginFootprint 10: R 0402_M; OriginFootprint 11: R 0603_M; OriginFootprint 12: R 0805_M; OriginFootprint 13: R 1206_M; OriginFootprint 14: R 1210_M; OriginFootprint 15: R 1812_M; OriginFootprint 16: R 2010_M; OriginFootprint 17: R 2512_M; UniqueId: 13e77c54ede4b306; AddInBom: yes; OriginModelName: R 0603; BOM名称: 贴片电阻; 联系售后: https://shop463601444.taobao.com; DesignItemID: R; LibraryName: 0.1 - 电阻-电容-电感; SymbolName: R; FootprintName: R 0603_L
footprint R 0603_L
pins: 1, 2

## R_173
designator R?, comment 1M
贴片电阻; Device: R; 版权归属: 来自淘宝 ID：黄晶宝石; 封装库来自淘宝卖家 ID：黄晶宝石: 其他店铺购入均为盗版，不享受售后技术支持服务，请立即申请退款; Origin Footprint: R 0201_L; OriginFootprint 2: R 0402_L; OriginFootprint 3: R 0805_L; OriginFootprint 4: R 1206_L; OriginFootprint 5: R 1210_L; OriginFootprint 6: R 1812_L; OriginFootprint 7: R 2010_L; OriginFootprint 8: R 2512_L; OriginFootprint 9: R 0201_M; OriginFootprint 10: R 0402_M; OriginFootprint 11: R 0603_M; OriginFootprint 12: R 0805_M; OriginFootprint 13: R 1206_M; OriginFootprint 14: R 1210_M; OriginFootprint 15: R 1812_M; OriginFootprint 16: R 2010_M; OriginFootprint 17: R 2512_M; UniqueId: ed5ed49cac6cc905; AddInBom: yes; OriginModelName: R 0603; BOM名称: 贴片电阻; 联系售后: https://shop463601444.taobao.com; DesignItemID: R; LibraryName: 0.1 - 电阻-电容-电感; SymbolName: R; FootprintName: R 0603_L
footprint R 0603_L
pins: 1, 2

## R_174
designator R?, comment 1M
贴片电阻; Device: R; 版权归属: 来自淘宝 ID：黄晶宝石; 封装库来自淘宝卖家 ID：黄晶宝石: 其他店铺购入均为盗版，不享受售后技术支持服务，请立即申请退款; Origin Footprint: R 0201_L; OriginFootprint 2: R 0402_L; OriginFootprint 3: R 0805_L; OriginFootprint 4: R 1206_L; OriginFootprint 5: R 1210_L; OriginFootprint 6: R 1812_L; OriginFootprint 7: R 2010_L; OriginFootprint 8: R 2512_L; OriginFootprint 9: R 0201_M; OriginFootprint 10: R 0402_M; OriginFootprint 11: R 0603_M; OriginFootprint 12: R 0805_M; OriginFootprint 13: R 1206_M; OriginFootprint 14: R 1210_M; OriginFootprint 15: R 1812_M; OriginFootprint 16: R 2010_M; OriginFootprint 17: R 2512_M; UniqueId: a32210a39874d8f8; AddInBom: yes; OriginModelName: R 0603; BOM名称: 贴片电阻; 联系售后: https://shop463601444.taobao.com; DesignItemID: R; LibraryName: 0.1 - 电阻-电容-电感; SymbolName: R; FootprintName: R 0603_L
footprint R 0603_L
pins: 1, 2

## R_175
designator R?, comment 1M
贴片电阻; Device: R; 版权归属: 来自淘宝 ID：黄晶宝石; 封装库来自淘宝卖家 ID：黄晶宝石: 其他店铺购入均为盗版，不享受售后技术支持服务，请立即申请退款; Origin Footprint: R 0201_L; OriginFootprint 2: R 0402_L; OriginFootprint 3: R 0805_L; OriginFootprint 4: R 1206_L; OriginFootprint 5: R 1210_L; OriginFootprint 6: R 1812_L; OriginFootprint 7: R 2010_L; OriginFootprint 8: R 2512_L; OriginFootprint 9: R 0201_M; OriginFootprint 10: R 0402_M; OriginFootprint 11: R 0603_M; OriginFootprint 12: R 0805_M; OriginFootprint 13: R 1206_M; OriginFootprint 14: R 1210_M; OriginFootprint 15: R 1812_M; OriginFootprint 16: R 2010_M; OriginFootprint 17: R 2512_M; UniqueId: d92c635076b33213; AddInBom: yes; OriginModelName: R 0603; BOM名称: 贴片电阻; 联系售后: https://shop463601444.taobao.com; DesignItemID: R; LibraryName: 0.1 - 电阻-电容-电感; SymbolName: R; FootprintName: R 0603_L
footprint R 0603_L
pins: 1, 2

## R_176
designator R?, comment 1M
贴片电阻; Device: R; 版权归属: 来自淘宝 ID：黄晶宝石; 封装库来自淘宝卖家 ID：黄晶宝石: 其他店铺购入均为盗版，不享受售后技术支持服务，请立即申请退款; Origin Footprint: R 0201_L; OriginFootprint 2: R 0402_L; OriginFootprint 3: R 0805_L; OriginFootprint 4: R 1206_L; OriginFootprint 5: R 1210_L; OriginFootprint 6: R 1812_L; OriginFootprint 7: R 2010_L; OriginFootprint 8: R 2512_L; OriginFootprint 9: R 0201_M; OriginFootprint 10: R 0402_M; OriginFootprint 11: R 0603_M; OriginFootprint 12: R 0805_M; OriginFootprint 13: R 1206_M; OriginFootprint 14: R 1210_M; OriginFootprint 15: R 1812_M; OriginFootprint 16: R 2010_M; OriginFootprint 17: R 2512_M; UniqueId: 5f673669f0d56d8f; AddInBom: yes; OriginModelName: R 0603; BOM名称: 贴片电阻; 联系售后: https://shop463601444.taobao.com; DesignItemID: R; LibraryName: 0.1 - 电阻-电容-电感; SymbolName: R; FootprintName: R 0603_L
footprint R 0603_L
pins: 1, 2

## R_177
designator R?, comment 1k
贴片电阻; Symbol: R; 版权归属: 来自淘宝 ID：黄晶宝石; 封装库来自淘宝卖家 ID：黄晶宝石: 其他店铺购入均为盗版，不享受售后技术支持服务，请立即申请退款; Origin Footprint: R 0201_L; OriginFootprint 2: R 0402_L; OriginFootprint 3: R 0805_L; OriginFootprint 4: R 1206_L; OriginFootprint 5: R 1210_L; OriginFootprint 6: R 1812_L; OriginFootprint 7: R 2010_L; OriginFootprint 8: R 2512_L; OriginFootprint 9: R 0201_M; OriginFootprint 10: R 0402_M; OriginFootprint 11: R 0603_M; OriginFootprint 12: R 0805_M; OriginFootprint 13: R 1206_M; OriginFootprint 14: R 1210_M; OriginFootprint 15: R 1812_M; OriginFootprint 16: R 2010_M; OriginFootprint 17: R 2512_M; Origin 3D Model Title: R 0603; AddInBom: yes; Device: R; BOM名称: 贴片电阻; 联系售后: https://shop463601444.taobao.com; DesignItemID: R; LibraryName: 0.1 - 电阻-电容-电感; FootprintName: R 0603_L
footprint R 0603_L
pins: 1, 2

## Res_0603
designator R?, comment 5.1K
Symbol: 电阻; Device: Res_0603; ConvertToPcb: yes; ModelId: fc143cca1e79419f9cd78b61e9279f08聨0819f05c4eef4c71ace90d822a990e87; ModelName: R0603; ModelTransform: 31.8897,63.7794,0,90,0,0,0,0,0; Value: 5.1K; AddInBom: yes; Supplier Footprint: 0603; FootprintName: R0603
footprint R0603
pins: 1, 2

## Res_0603_1
designator R?, comment 5.1K
Symbol: 电阻; Device: Res_0603; 3D Model: fc143cca1e79419f9cd78b61e9279f08聨0819f05c4eef4c71ace90d822a990e87; 3D Model Transform: 31.8897,63.7794,0,90,0,0,0,0,0; ConvertToPcb: yes; ModelName: R0603; Value: 5.1K; Supplier Footprint: 0603; AddInBom: yes; FootprintName: R0603
footprint R0603
3D model R0603
pins: 1, 2

## STM32F103C8T6
designator U?
CPU内核:ARM-M3;CPU最大主频:72MHz;应用领域:-;; Manufacturer: ST(意法半导体); AddInBom: yes; ModelId: 093be70396ff421eb2cdb946d5311efc聨0819f05c4eef4c71ace90d822a990e87; ModelName: LQFP-48_L7.0-W7.0-H1.4-LS9.0-P0.50; ModelTransform: 354.331,354.331,0,0,0,0,0,0,0; CPU Core: ARM-M3; CPU Maximum Speed: 72MHz; Program Storage Size: 64KB; Program Memory Type: FLASH; Number of I/O: 37; ADC (Bit): 12bit; Voltage - Supply: 2V~3.6V; Symbol: STM32F103C8T6; Device: STM32F103C8T6; LCSC Part Name: 主流增强型ARM Cortex-M3 MCU，具有64 KB Flash、72 MHz CPU、电机控制、USB和CAN; SupplierPart: C8734; ManufacturerPart: STM32F103C8T6; Supplier Footprint: LQFP-48(7x7); JLCPCB Part Class: Extended Part; Datasheet: https://item.szlcsc.com/datasheet/STM32F103C8T6/9243.html; Supplier: LCSC; ConvertToPcb: yes; FootprintName: LQFP-48_L7.0-W7.0-P0.50-LS9.0-BL; Applications: -
footprint LQFP-48_L7.0-W7.0-P0.50-LS9.0-BL
pins: 1 VBAT, 2 PC13-TAMPER-RTC, 3 PC14-OSC32_IN, 4 PC15-OSC32_OUT, 5 PD0-OSC_IN, 6 PD1-OSC_OUT, 7 NRST, 8 VSSA, 9 VDDA, 10 PA0-WKUP, 11 PA1, 12 PA2, 13 PA3, 14 PA4, 15 PA5, 16 PA6, 17 PA7, 18 PB0, 19 PB1, 20 PB2, 21 PB10, 22 PB11, 23 VSS_1, 24 VDD_1, 25 PB12, 26 PB13, 27 PB14, 28 PB15, 29 PA8, 30 PA9, 31 PA10, 32 PA11, 33 PA12, 34 PA13, 35 VSS_2, 36 VDD_2, 37 PA14, 38 PA15, 39 PB3, 40 PB4, 41 PB5, 42 PB6, 43 PB7, 44 BOOT0, 45 PB8, 46 PB9, 47 VSS_3, 48 VDD_3

## SW-PB
designator S?  (value not drawn)
微动开关; Origin Footprint: SW_PB2_C1; OriginFootprint 2: SW_PB2_B1; UniqueId: 0ac0bd892f9b1ec0; AddInBom: yes; OriginModelName: SMD按键; Device: SW-PB; Published: 24-Mar-1999; LatestRevisionDate: 17-Jul-2002; LatestRevisionNote: Re-released for DXP Platform.; PackageReference: SPST-2; Publisher: Altium Limited; DesignItemID: SW-PB; LibraryName: 0.7 - 常用按键-开关; SymbolName: SW-PB; FootprintName: SW_PB2_A1
footprint SW_PB2_A1
pins: 1, 2

## TJA1050
designator IC?
CAN总线收发芯片; 版权归属: 封装库来自淘宝 ID：黄晶宝石; Origin Footprint: SOP8_L; OriginFootprint 2: SOP8_N; UniqueId: 0c396391978b946d; AddInBom: yes; OriginModelName: SOP8; Device: TJA1050; BOM名称: CAN总线收发芯片; 学习资源: https://shop463601444.taobao.com; DesignItemID: TJA1050; LibraryName: 1.0 - 常见芯片; SymbolName: TJA1050; FootprintName: SOP8_M
footprint SOP8_M
pins: 1 TXD, 2 GND, 3 VCC, 4 RXD, 5 VREF, 6 CANL, 7 CANH, 8 S

## TPS7A3301RGWR
designator U?, comment TPS7A3301
Manufacturer: TI(德州仪器); Device: TPS7A3301RGWR; Add into BOM: yes; Output Type: 可调; Voltage - Supply: 35V; Output Voltage: 1.175V~33.2V; Output Current: 1A; Power Supply Rejection Ratio (PSRR): 72dB@(10kHz); Voltage Dropout: 290mV@(500mA); standby current: 210uA; Noise: 16uVrms; Output Configuration: 负极; Number of Outputs: 1; Origin Footprint: VQFN-20_L5.0-W5.0-P0.65-TL-EP; UniqueId: 5538d501d87f28cd; LCSC Part Name: 具有使能功能的 1A、高 PSRR、负电压、可调节低压降稳压器; Supplier Part: C90082; Manufacturer Part: TPS7A3301RGWR; Supplier Footprint: VQFN-20-EP(5x5); JLCPCB Part Class: Extended Part; Datasheet: https://www.ti.com/cn/lit/gpn/tps7a33; Supplier: LCSC; Convert to PCB: yes; Features: 欠压锁定；过流保护；带使能；过热保护; Operating Temperature: -40℃~+125℃@(Tj); OriginFootprint 2: VQFN-20_L5.0-W5.0-P0.65-TL-EP; DesignItemID: TPS7A3301RGWR; LibraryName: TPS7A3301RGWR1_TPS7A3301RGWR; SymbolName: TPS7A3301RGWR; FootprintName: PCBComponent_1
footprint PCBComponent_1
pins: 1 OUT, 3 FB, 7 GND, 13 EN, 14 NR/SS, 15 IN, 16 IN, 20 OUT

## TPS7A4701
designator U?
Origin Footprint: VQFN-20_L5.0-W5.0-P0.65-TL-EP; OriginFootprint 2: VQFN; UniqueId: 6f04254088248330; AddInBom: yes; Device: TPS7A4701; DesignItemID: TPS7A4701; LibraryName: 1.1 - 电源类芯片; SymbolName: TPS7A4701; FootprintName: PCBComponent_1
footprint PCBComponent_1
pins: 1 OUT, 3 SENSE, 4 6P4V2, 5 6P4V1, 6 3P2V, 7 GND, 8 1P6V, 9 0P8V, 10 0P4V, 11 0P2V, 12 0P1V, 13 EN, 14 NR, 15 IN, 16 IN, 20 OUT

## TVS
designator D?  (value not drawn)
TVS保护; Type: E6.8CA; Origin Footprint: DIODE-AXL; OriginFootprint 3: DIODE-SMB; UniqueId: 6eb2f7ba7a12821c; AddInBom: yes; Device: TVS; Published: 8-Jun-2000; LatestRevisionDate: 17-Jul-2002; LatestRevisionNote: Re-released for DXP Platform.; PackageDocument: Sep-1996; PackageReference: SMC; Publisher: Altium Limited; Code_JEDEC: DO-214-AB; OriginFootprint 2: DIODE-1206; DesignItemID: TVS; LibraryName: 0.2 - 二极管-整流桥; SymbolName: TVS; FootprintName: DIODE-SMA
footprint DIODE-SMA
pins: 1 A, 2 K

## TVS_1
designator D?, comment TVS  (value not drawn)
TVS保护; Type: E6.8CA; Origin Footprint: DIODE-AXL; OriginFootprint 3: DIODE-SMB; UniqueId: cca08e5caf06c018; AddInBom: yes; Device: TVS; Published: 8-Jun-2000; LatestRevisionDate: 17-Jul-2002; LatestRevisionNote: Re-released for DXP Platform.; PackageDocument: Sep-1996; PackageReference: SMC; Publisher: Altium Limited; Code_JEDEC: DO-214-AB; OriginFootprint 2: DIODE-1206; DesignItemID: TVS; LibraryName: 0.2 - 二极管-整流桥; SymbolName: TVS; FootprintName: DIODE-SMA
footprint DIODE-SMA
pins: 1 A, 2 K

## TVS_2
designator D?, comment TVS  (value not drawn)
TVS保护; Type: E6.8CA; Origin Footprint: DIODE-AXL; OriginFootprint 3: DIODE-SMB; UniqueId: ff0c81595de38f51; AddInBom: yes; Device: TVS; Published: 8-Jun-2000; LatestRevisionDate: 17-Jul-2002; LatestRevisionNote: Re-released for DXP Platform.; PackageDocument: Sep-1996; PackageReference: SMC; Publisher: Altium Limited; Code_JEDEC: DO-214-AB; OriginFootprint 2: DIODE-1206; DesignItemID: TVS; LibraryName: 0.2 - 二极管-整流桥; SymbolName: TVS; FootprintName: DIODE-SMA
footprint DIODE-SMA
pins: 1 A, 2 K

## TVS_3
designator D?, comment TVS  (value not drawn)
TVS保护; Type: E6.8CA; Origin Footprint: DIODE-AXL; OriginFootprint 3: DIODE-SMB; UniqueId: 260e63abbc5bbcdd; AddInBom: yes; Device: TVS; Published: 8-Jun-2000; LatestRevisionDate: 17-Jul-2002; LatestRevisionNote: Re-released for DXP Platform.; PackageDocument: Sep-1996; PackageReference: SMC; Publisher: Altium Limited; Code_JEDEC: DO-214-AB; OriginFootprint 2: DIODE-1206; DesignItemID: TVS; LibraryName: 0.2 - 二极管-整流桥; SymbolName: TVS; FootprintName: DIODE-SMA
footprint DIODE-SMA
pins: 1 A, 2 K

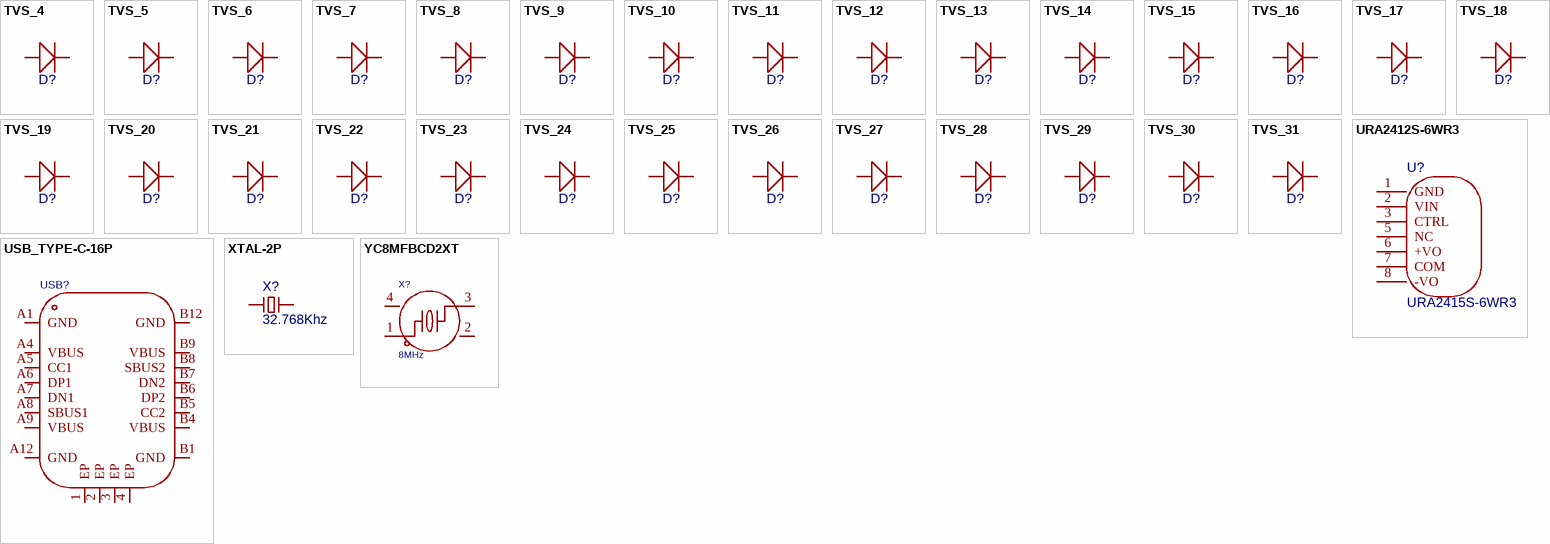
[diagram p10: symbols TVS_4 to YC8MFBCD2XT]

## TVS_4
designator D?, comment TVS  (value not drawn)
TVS保护; Type: E6.8CA; Origin Footprint: DIODE-AXL; OriginFootprint 3: DIODE-SMB; UniqueId: 81689f1d3303caec; AddInBom: yes; Device: TVS; Published: 8-Jun-2000; LatestRevisionDate: 17-Jul-2002; LatestRevisionNote: Re-released for DXP Platform.; PackageDocument: Sep-1996; PackageReference: SMC; Publisher: Altium Limited; Code_JEDEC: DO-214-AB; OriginFootprint 2: DIODE-1206; DesignItemID: TVS; LibraryName: 0.2 - 二极管-整流桥; SymbolName: TVS; FootprintName: DIODE-SMA
footprint DIODE-SMA
pins: 1 A, 2 K

## TVS_5
designator D?, comment TVS  (value not drawn)
TVS保护; Type: E6.8CA; Origin Footprint: DIODE-AXL; OriginFootprint 3: DIODE-SMB; UniqueId: 6a4368da87585c93; AddInBom: yes; Device: TVS; Published: 8-Jun-2000; LatestRevisionDate: 17-Jul-2002; LatestRevisionNote: Re-released for DXP Platform.; PackageDocument: Sep-1996; PackageReference: SMC; Publisher: Altium Limited; Code_JEDEC: DO-214-AB; OriginFootprint 2: DIODE-1206; DesignItemID: TVS; LibraryName: 0.2 - 二极管-整流桥; SymbolName: TVS; FootprintName: DIODE-SMA
footprint DIODE-SMA
pins: 1 A, 2 K

## TVS_6
designator D?, comment TVS  (value not drawn)
TVS保护; Type: E6.8CA; Origin Footprint: DIODE-AXL; OriginFootprint 3: DIODE-SMB; UniqueId: 63002c75ba05748a; AddInBom: yes; Device: TVS; Published: 8-Jun-2000; LatestRevisionDate: 17-Jul-2002; LatestRevisionNote: Re-released for DXP Platform.; PackageDocument: Sep-1996; PackageReference: SMC; Publisher: Altium Limited; Code_JEDEC: DO-214-AB; OriginFootprint 2: DIODE-1206; DesignItemID: TVS; LibraryName: 0.2 - 二极管-整流桥; SymbolName: TVS; FootprintName: DIODE-SMA
footprint DIODE-SMA
pins: 1 A, 2 K

## TVS_7
designator D?, comment TVS  (value not drawn)
TVS保护; Type: E6.8CA; Origin Footprint: DIODE-AXL; OriginFootprint 3: DIODE-SMB; UniqueId: a80f7d1f54f711b8; AddInBom: yes; Device: TVS; Published: 8-Jun-2000; LatestRevisionDate: 17-Jul-2002; LatestRevisionNote: Re-released for DXP Platform.; PackageDocument: Sep-1996; PackageReference: SMC; Publisher: Altium Limited; Code_JEDEC: DO-214-AB; OriginFootprint 2: DIODE-1206; DesignItemID: TVS; LibraryName: 0.2 - 二极管-整流桥; SymbolName: TVS; FootprintName: DIODE-SMA
footprint DIODE-SMA
pins: 1 A, 2 K

## TVS_8
designator D?, comment TVS  (value not drawn)
TVS保护; Type: E6.8CA; Origin Footprint: DIODE-AXL; OriginFootprint 3: DIODE-SMB; UniqueId: aa27cf4c2f614704; AddInBom: yes; Device: TVS; Published: 8-Jun-2000; LatestRevisionDate: 17-Jul-2002; LatestRevisionNote: Re-released for DXP Platform.; PackageDocument: Sep-1996; PackageReference: SMC; Publisher: Altium Limited; Code_JEDEC: DO-214-AB; OriginFootprint 2: DIODE-1206; DesignItemID: TVS; LibraryName: 0.2 - 二极管-整流桥; SymbolName: TVS; FootprintName: DIODE-SMA
footprint DIODE-SMA
pins: 1 A, 2 K

## TVS_9
designator D?, comment TVS  (value not drawn)
TVS保护; Type: E6.8CA; Origin Footprint: DIODE-AXL; OriginFootprint 3: DIODE-SMB; UniqueId: 0b466d7a0d9696a1; AddInBom: yes; Device: TVS; Published: 8-Jun-2000; LatestRevisionDate: 17-Jul-2002; LatestRevisionNote: Re-released for DXP Platform.; PackageDocument: Sep-1996; PackageReference: SMC; Publisher: Altium Limited; Code_JEDEC: DO-214-AB; OriginFootprint 2: DIODE-1206; DesignItemID: TVS; LibraryName: 0.2 - 二极管-整流桥; SymbolName: TVS; FootprintName: DIODE-SMA
footprint DIODE-SMA
pins: 1 A, 2 K

## TVS_10
designator D?, comment TVS  (value not drawn)
TVS保护; Type: E6.8CA; Origin Footprint: DIODE-AXL; OriginFootprint 3: DIODE-SMB; UniqueId: d3460379f3d05a2a; AddInBom: yes; Device: TVS; Published: 8-Jun-2000; LatestRevisionDate: 17-Jul-2002; LatestRevisionNote: Re-released for DXP Platform.; PackageDocument: Sep-1996; PackageReference: SMC; Publisher: Altium Limited; Code_JEDEC: DO-214-AB; OriginFootprint 2: DIODE-1206; DesignItemID: TVS; LibraryName: 0.2 - 二极管-整流桥; SymbolName: TVS; FootprintName: DIODE-SMA
footprint DIODE-SMA
pins: 1 A, 2 K

## TVS_11
designator D?, comment TVS  (value not drawn)
TVS保护; Type: E6.8CA; Origin Footprint: DIODE-AXL; OriginFootprint 3: DIODE-SMB; UniqueId: f1c346e37d3cba37; AddInBom: yes; Device: TVS; Published: 8-Jun-2000; LatestRevisionDate: 17-Jul-2002; LatestRevisionNote: Re-released for DXP Platform.; PackageDocument: Sep-1996; PackageReference: SMC; Publisher: Altium Limited; Code_JEDEC: DO-214-AB; OriginFootprint 2: DIODE-1206; DesignItemID: TVS; LibraryName: 0.2 - 二极管-整流桥; SymbolName: TVS; FootprintName: DIODE-SMA
footprint DIODE-SMA
pins: 1 A, 2 K

## TVS_12
designator D?, comment TVS  (value not drawn)
TVS保护; Type: E6.8CA; Origin Footprint: DIODE-AXL; OriginFootprint 3: DIODE-SMB; UniqueId: 61ba849a9213f6b6; AddInBom: yes; Device: TVS; Published: 8-Jun-2000; LatestRevisionDate: 17-Jul-2002; LatestRevisionNote: Re-released for DXP Platform.; PackageDocument: Sep-1996; PackageReference: SMC; Publisher: Altium Limited; Code_JEDEC: DO-214-AB; OriginFootprint 2: DIODE-1206; DesignItemID: TVS; LibraryName: 0.2 - 二极管-整流桥; SymbolName: TVS; FootprintName: DIODE-SMA
footprint DIODE-SMA
pins: 1 A, 2 K

## TVS_13
designator D?, comment TVS  (value not drawn)
TVS保护; Type: E6.8CA; Origin Footprint: DIODE-AXL; OriginFootprint 3: DIODE-SMB; UniqueId: d726a396729c3148; AddInBom: yes; Device: TVS; Published: 8-Jun-2000; LatestRevisionDate: 17-Jul-2002; LatestRevisionNote: Re-released for DXP Platform.; PackageDocument: Sep-1996; PackageReference: SMC; Publisher: Altium Limited; Code_JEDEC: DO-214-AB; OriginFootprint 2: DIODE-1206; DesignItemID: TVS; LibraryName: 0.2 - 二极管-整流桥; SymbolName: TVS; FootprintName: DIODE-SMA
footprint DIODE-SMA
pins: 1 A, 2 K

## TVS_14
designator D?, comment TVS  (value not drawn)
TVS保护; Type: E6.8CA; Origin Footprint: DIODE-AXL; OriginFootprint 3: DIODE-SMB; UniqueId: ff96faf82be08131; AddInBom: yes; Device: TVS; Published: 8-Jun-2000; LatestRevisionDate: 17-Jul-2002; LatestRevisionNote: Re-released for DXP Platform.; PackageDocument: Sep-1996; PackageReference: SMC; Publisher: Altium Limited; Code_JEDEC: DO-214-AB; OriginFootprint 2: DIODE-1206; DesignItemID: TVS; LibraryName: 0.2 - 二极管-整流桥; SymbolName: TVS; FootprintName: DIODE-SMA
footprint DIODE-SMA
pins: 1 A, 2 K

## TVS_15
designator D?, comment TVS  (value not drawn)
TVS保护; Type: E6.8CA; Origin Footprint: DIODE-AXL; OriginFootprint 3: DIODE-SMB; UniqueId: 643ee5a57f85a719; AddInBom: yes; Device: TVS; Published: 8-Jun-2000; LatestRevisionDate: 17-Jul-2002; LatestRevisionNote: Re-released for DXP Platform.; PackageDocument: Sep-1996; PackageReference: SMC; Publisher: Altium Limited; Code_JEDEC: DO-214-AB; OriginFootprint 2: DIODE-1206; DesignItemID: TVS; LibraryName: 0.2 - 二极管-整流桥; SymbolName: TVS; FootprintName: DIODE-SMA
footprint DIODE-SMA
pins: 1 A, 2 K

## TVS_16
designator D?, comment TVS  (value not drawn)
TVS保护; Type: E6.8CA; Origin Footprint: DIODE-AXL; OriginFootprint 3: DIODE-SMB; UniqueId: c78e401042ffeb04; AddInBom: yes; Device: TVS; Published: 8-Jun-2000; LatestRevisionDate: 17-Jul-2002; LatestRevisionNote: Re-released for DXP Platform.; PackageDocument: Sep-1996; PackageReference: SMC; Publisher: Altium Limited; Code_JEDEC: DO-214-AB; OriginFootprint 2: DIODE-1206; DesignItemID: TVS; LibraryName: 0.2 - 二极管-整流桥; SymbolName: TVS; FootprintName: DIODE-SMA
footprint DIODE-SMA
pins: 1 A, 2 K

## TVS_17
designator D?, comment TVS  (value not drawn)
TVS保护; Type: E6.8CA; Origin Footprint: DIODE-AXL; OriginFootprint 3: DIODE-SMB; UniqueId: 992515b309601006; AddInBom: yes; Device: TVS; Published: 8-Jun-2000; LatestRevisionDate: 17-Jul-2002; LatestRevisionNote: Re-released for DXP Platform.; PackageDocument: Sep-1996; PackageReference: SMC; Publisher: Altium Limited; Code_JEDEC: DO-214-AB; OriginFootprint 2: DIODE-1206; DesignItemID: TVS; LibraryName: 0.2 - 二极管-整流桥; SymbolName: TVS; FootprintName: DIODE-SMA
footprint DIODE-SMA
pins: 1 A, 2 K

## TVS_18
designator D?, comment TVS  (value not drawn)
TVS保护; Type: E6.8CA; Origin Footprint: DIODE-AXL; OriginFootprint 3: DIODE-SMB; UniqueId: 53934f69bf371090; AddInBom: yes; Device: TVS; Published: 8-Jun-2000; LatestRevisionDate: 17-Jul-2002; LatestRevisionNote: Re-released for DXP Platform.; PackageDocument: Sep-1996; PackageReference: SMC; Publisher: Altium Limited; Code_JEDEC: DO-214-AB; OriginFootprint 2: DIODE-1206; DesignItemID: TVS; LibraryName: 0.2 - 二极管-整流桥; SymbolName: TVS; FootprintName: DIODE-SMA
footprint DIODE-SMA
pins: 1 A, 2 K

## TVS_19
designator D?, comment TVS  (value not drawn)
TVS保护; Type: E6.8CA; Origin Footprint: DIODE-AXL; OriginFootprint 3: DIODE-SMB; UniqueId: bb72c45039ba0737; AddInBom: yes; Device: TVS; Published: 8-Jun-2000; LatestRevisionDate: 17-Jul-2002; LatestRevisionNote: Re-released for DXP Platform.; PackageDocument: Sep-1996; PackageReference: SMC; Publisher: Altium Limited; Code_JEDEC: DO-214-AB; OriginFootprint 2: DIODE-1206; DesignItemID: TVS; LibraryName: 0.2 - 二极管-整流桥; SymbolName: TVS; FootprintName: DIODE-SMA
footprint DIODE-SMA
pins: 1 A, 2 K

## TVS_20
designator D?, comment TVS  (value not drawn)
TVS保护; Type: E6.8CA; Origin Footprint: DIODE-AXL; OriginFootprint 3: DIODE-SMB; UniqueId: 9f82fdb901c26414; AddInBom: yes; Device: TVS; Published: 8-Jun-2000; LatestRevisionDate: 17-Jul-2002; LatestRevisionNote: Re-released for DXP Platform.; PackageDocument: Sep-1996; PackageReference: SMC; Publisher: Altium Limited; Code_JEDEC: DO-214-AB; OriginFootprint 2: DIODE-1206; DesignItemID: TVS; LibraryName: 0.2 - 二极管-整流桥; SymbolName: TVS; FootprintName: DIODE-SMA
footprint DIODE-SMA
pins: 1 A, 2 K

## TVS_21
designator D?, comment TVS  (value not drawn)
TVS保护; Type: E6.8CA; Origin Footprint: DIODE-AXL; OriginFootprint 3: DIODE-SMB; UniqueId: 3aeeeeabff7ae3be; AddInBom: yes; Device: TVS; Published: 8-Jun-2000; LatestRevisionDate: 17-Jul-2002; LatestRevisionNote: Re-released for DXP Platform.; PackageDocument: Sep-1996; PackageReference: SMC; Publisher: Altium Limited; Code_JEDEC: DO-214-AB; OriginFootprint 2: DIODE-1206; DesignItemID: TVS; LibraryName: 0.2 - 二极管-整流桥; SymbolName: TVS; FootprintName: DIODE-SMA
footprint DIODE-SMA
pins: 1 A, 2 K

## TVS_22
designator D?, comment TVS  (value not drawn)
TVS保护; Type: E6.8CA; Origin Footprint: DIODE-AXL; OriginFootprint 3: DIODE-SMB; UniqueId: dcd4dca28a336904; AddInBom: yes; Device: TVS; Published: 8-Jun-2000; LatestRevisionDate: 17-Jul-2002; LatestRevisionNote: Re-released for DXP Platform.; PackageDocument: Sep-1996; PackageReference: SMC; Publisher: Altium Limited; Code_JEDEC: DO-214-AB; OriginFootprint 2: DIODE-1206; DesignItemID: TVS; LibraryName: 0.2 - 二极管-整流桥; SymbolName: TVS; FootprintName: DIODE-SMA
footprint DIODE-SMA
pins: 1 A, 2 K

## TVS_23
designator D?, comment TVS  (value not drawn)
TVS保护; Type: E6.8CA; Origin Footprint: DIODE-AXL; OriginFootprint 3: DIODE-SMB; UniqueId: 8cd36cf554751316; AddInBom: yes; Device: TVS; Published: 8-Jun-2000; LatestRevisionDate: 17-Jul-2002; LatestRevisionNote: Re-released for DXP Platform.; PackageDocument: Sep-1996; PackageReference: SMC; Publisher: Altium Limited; Code_JEDEC: DO-214-AB; OriginFootprint 2: DIODE-1206; DesignItemID: TVS; LibraryName: 0.2 - 二极管-整流桥; SymbolName: TVS; FootprintName: DIODE-SMA
footprint DIODE-SMA
pins: 1 A, 2 K

## TVS_24
designator D?, comment TVS  (value not drawn)
TVS保护; Type: E6.8CA; Origin Footprint: DIODE-AXL; OriginFootprint 3: DIODE-SMB; UniqueId: e0ff00c77f114926; AddInBom: yes; Device: TVS; Published: 8-Jun-2000; LatestRevisionDate: 17-Jul-2002; LatestRevisionNote: Re-released for DXP Platform.; PackageDocument: Sep-1996; PackageReference: SMC; Publisher: Altium Limited; Code_JEDEC: DO-214-AB; OriginFootprint 2: DIODE-1206; DesignItemID: TVS; LibraryName: 0.2 - 二极管-整流桥; SymbolName: TVS; FootprintName: DIODE-SMA
footprint DIODE-SMA
pins: 1 A, 2 K

## TVS_25
designator D?, comment TVS  (value not drawn)
TVS保护; Type: E6.8CA; Origin Footprint: DIODE-AXL; OriginFootprint 3: DIODE-SMB; UniqueId: 731c7b39eca2360f; AddInBom: yes; Device: TVS; Published: 8-Jun-2000; LatestRevisionDate: 17-Jul-2002; LatestRevisionNote: Re-released for DXP Platform.; PackageDocument: Sep-1996; PackageReference: SMC; Publisher: Altium Limited; Code_JEDEC: DO-214-AB; OriginFootprint 2: DIODE-1206; DesignItemID: TVS; LibraryName: 0.2 - 二极管-整流桥; SymbolName: TVS; FootprintName: DIODE-SMA
footprint DIODE-SMA
pins: 1 A, 2 K

## TVS_26
designator D?, comment TVS  (value not drawn)
TVS保护; Type: E6.8CA; Origin Footprint: DIODE-AXL; OriginFootprint 3: DIODE-SMB; UniqueId: 1b5fc82bf4e6878c; AddInBom: yes; Device: TVS; Published: 8-Jun-2000; LatestRevisionDate: 17-Jul-2002; LatestRevisionNote: Re-released for DXP Platform.; PackageDocument: Sep-1996; PackageReference: SMC; Publisher: Altium Limited; Code_JEDEC: DO-214-AB; OriginFootprint 2: DIODE-1206; DesignItemID: TVS; LibraryName: 0.2 - 二极管-整流桥; SymbolName: TVS; FootprintName: DIODE-SMA
footprint DIODE-SMA
pins: 1 A, 2 K

## TVS_27
designator D?, comment TVS  (value not drawn)
TVS保护; Type: E6.8CA; Origin Footprint: DIODE-AXL; OriginFootprint 3: DIODE-SMB; UniqueId: 5109e2beb149ca6a; AddInBom: yes; Device: TVS; Published: 8-Jun-2000; LatestRevisionDate: 17-Jul-2002; LatestRevisionNote: Re-released for DXP Platform.; PackageDocument: Sep-1996; PackageReference: SMC; Publisher: Altium Limited; Code_JEDEC: DO-214-AB; OriginFootprint 2: DIODE-1206; DesignItemID: TVS; LibraryName: 0.2 - 二极管-整流桥; SymbolName: TVS; FootprintName: DIODE-SMA
footprint DIODE-SMA
pins: 1 A, 2 K

## TVS_28
designator D?, comment TVS  (value not drawn)
TVS保护; Type: E6.8CA; Origin Footprint: DIODE-AXL; OriginFootprint 3: DIODE-SMB; UniqueId: 739fe73705ca67f8; AddInBom: yes; Device: TVS; Published: 8-Jun-2000; LatestRevisionDate: 17-Jul-2002; LatestRevisionNote: Re-released for DXP Platform.; PackageDocument: Sep-1996; PackageReference: SMC; Publisher: Altium Limited; Code_JEDEC: DO-214-AB; OriginFootprint 2: DIODE-1206; DesignItemID: TVS; LibraryName: 0.2 - 二极管-整流桥; SymbolName: TVS; FootprintName: DIODE-SMA
footprint DIODE-SMA
pins: 1 A, 2 K